# EAGLE library part ELVX-L10D-HRRN-C-N2A4 (library ELVX-L10D-HRRN-C-N2A4)
Pressure Sensor +/-0.36PSI (+/-2.49kPa) Differential Male - 0.08" (1.93mm) Tube, Dual 14 b 8-SMD, No Lead, Dual Ports, Same Side, 3.3V, -25C ~ 85C Source: Datasheet <https://allsensors.com/hubfs/Product-Data-Sheets/DS-0452.pdf>
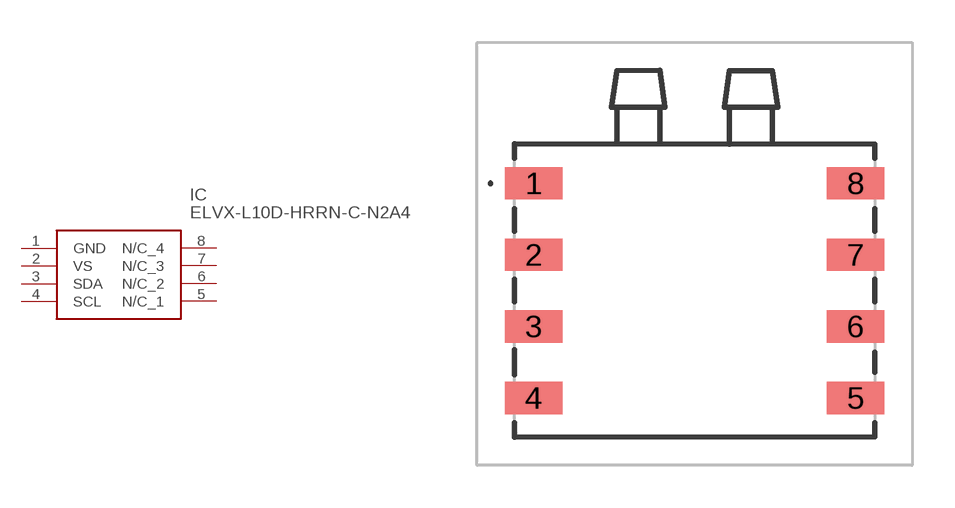
[diagram p0: symbol with the pads of ELVXL10DHRRNCN2A4; footprint ELVXL10DHRRNCN2A4]

Designator prefix IC

## ELVX-L10D-HRRN-C-N2A4 (DESCRIPTION: Pressure Sensor +/-0.36PSI (+/-2.49kPa) Differential Male - 0.08" (1.93mm) Tube, Dual 14 b 8-SMD, No Lead, Dual Ports, Same Side, 3.3V, -25C ~ 85C; HEIGHT: 4.33mm; MANUFACTURER_NAME: Amphenol; MANUFACTURER_PART_NUMBER: ELVX-L10D-HRRN-C-N2A4)  [ELVXL10DHRRNCN2A4]
1  GND
2  VS
3  SDA
4  SCL
5  N/C_1
6  N/C_2
7  N/C_3
8  N/C_4

## Footprint ELVXL10DHRRNCN2A4 (pad centres in mm)
ELVX-L10D-HRRN-C-N2A4-1
smd 2.03 x 1.14: 1 -5.715,2.5; 2 -5.715,-0.04; 3 -5.715,-2.58; 4 -5.715,-5.12; 5 5.715,-5.12; 6 5.715,-2.58; 7 5.715,-0.04; 8 5.715,2.5